# Altium footprint library DIP794W56P254L3486H508Q28N.PcbLib: 1 footprints
Each footprint in its own frame and in the unit in brackets; x right, y up, seen from the top. Pads: shape width x height; smd on the part's side, far side on the other; paste and mask are expansions set on the pad; w line width, h text height; cw(c..) or ccw(c..) is an arc to the next point about the centre after c.
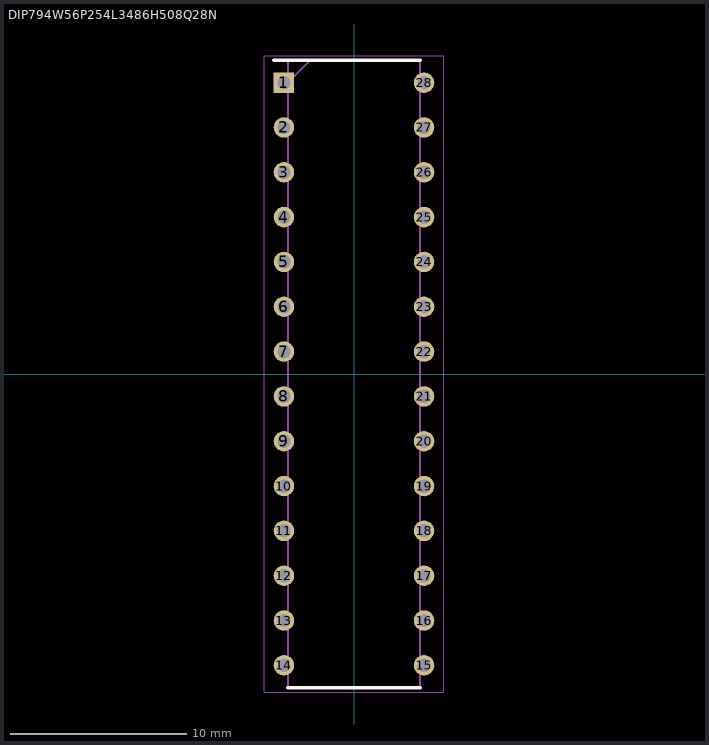
[diagram p0: the footprint, top view; thin cyan lines are the x and y axes]

## DIP794W56P254L3486H508Q28N [mil]
pads (28):
  rect 45.63x45.63 / inner round 45.63 / far side rect 45.63x45.63 hole 29.88: 1(-156.26,650)
  round 45.63 hole 29.88: 2(-156.26,550) 3(-156.26,450) 4(-156.26,350) 5(-156.26,250) 6(-156.26,150) 7(-156.26,50) 8(-156.26,-50) 9(-156.26,-150) 10(-156.26,-250) 11(-156.26,-350) 12(-156.26,-450) 13(-156.26,-550) 14(-156.26,-650) 15(156.26,-650) 16(156.26,-550) 17(156.26,-450) 18(156.26,-350) 19(156.26,-250) 20(156.26,-150) 21(156.26,-50) 22(156.26,50) 23(156.26,150) 24(156.26,250) 25(156.26,350) 26(156.26,450) 27(156.26,550) 28(156.26,650)
Top Overlay:
  lines w7.87: -179.06,700 147.48,700 ; -147.48,-700 147.48,-700
Mechanical 15:
  lines w3.94: -147.48,650 -97.48,700 ; -147.48,-700 -147.48,700 147.48,700 147.48,-700 -147.48,-700
Mechanical 20:
  lines w1.97: -200.16,-709.84 -200.16,709.84 200.16,709.84 200.16,-709.84 -200.16,-709.84
3D body "AVR128DB28-I_SP.stp": height 200, standoff -137.8, extent -161.75,-685 161.75,687.5